# Altium footprint library WR-TBL_Pluggable Connector_5.08mm.PcbLib: 295 footprints (part 5 of 19)
Each footprint in its own frame and in the unit in brackets; x right, y up, seen from the top. Pads: shape width x height; smd on the part's side, far side on the other; paste and mask are expansions set on the pad; w line width, h text height; cw(c..) or ccw(c..) is an arc to the next point about the centre after c.
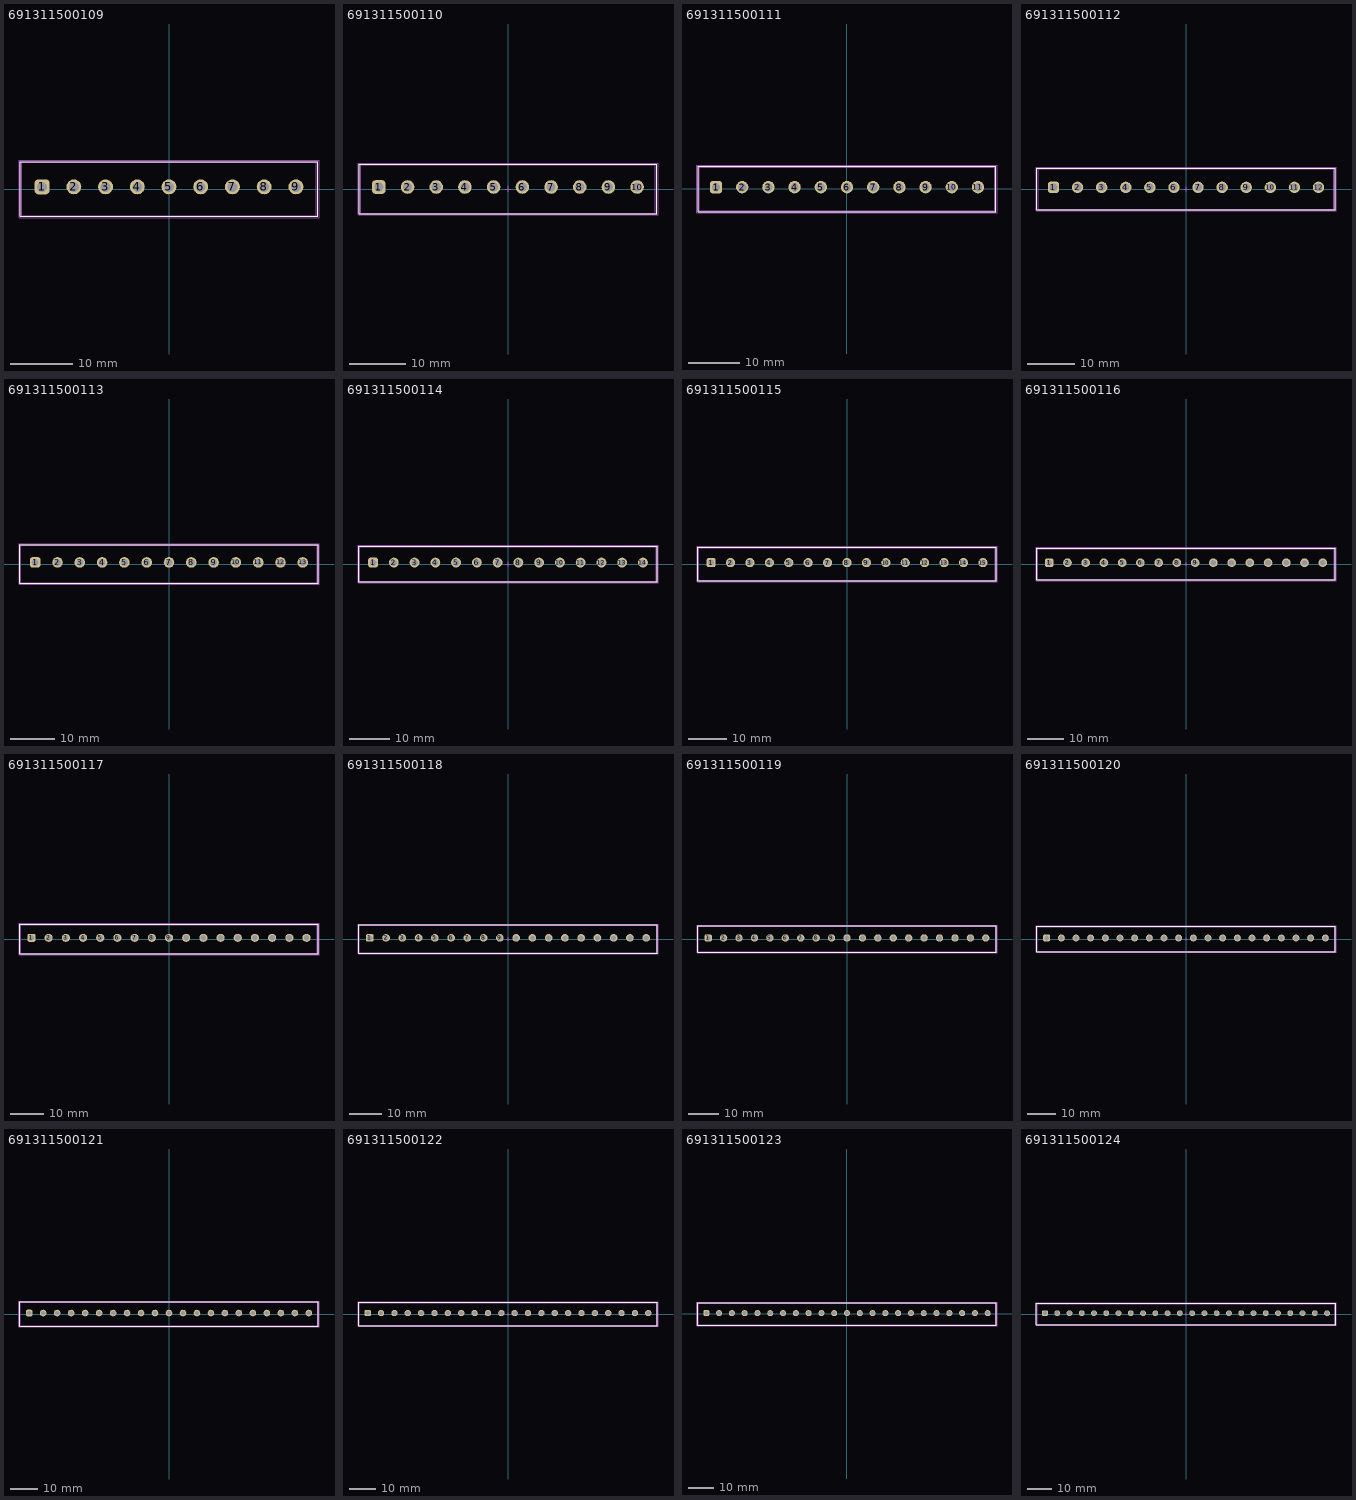
[diagram p4: the footprints below, top view; thin cyan lines are the x and y axes]

## 691311500109 [mm] "5,08mm - PCB Headers - Vertical - Closed ends -09p"
height 12
pads (9):
  rrect50% 2.4x2.4 hole 1.6: 1(-20.32,0.35)
  round 2.4 hole 1.6: 2(-15.24,0.35) 3(-10.16,0.35) 4(-5.08,0.35) 5(0,0.35) 6(5.08,0.35) 7(10.16,0.35) 8(15.24,0.35) 9(20.32,0.35)
Top Overlay:
  lines w0.2: -23.81,-4.4 23.81,-4.4 23.81,4.4 -23.81,4.4 -23.81,-4.4
Top Assembly:
  lines w0.1: -23.81,-4.4 -23.81,4.4 23.81,4.4 23.81,-4.4 -23.81,-4.4
Top Designator:
  text ".Designator" at -3.647,-0.357 h1
Top 3D Body:
  lines w0.1: -23.56,-4.25 23.56,-4.25 23.56,4.25 -23.56,4.25 -23.56,-4.25
Top Courtyard:
  lines w0.05: -24.01,-4.6 24.01,-4.6 24.01,4.6 -24.01,4.6 -24.01,-4.6
Top Component Center:
  lines w0.1: -0.5,0 0.5,0 ; 0,-0.5 0,0.5
3D body "691311500109.stp": height 12.05, standoff -3.95, extent -23.56,-4.25 23.56,4.25

## 691311500110 [mm] "5,08mm - PCB Headers - Vertical - Closed ends -10p"
height 12
pads (10):
  rrect50% 2.4x2.4 hole 1.6: 1(-22.86,0.35)
  round 2.4 hole 1.6: 2(-17.78,0.35) 3(-12.7,0.35) 4(-7.62,0.35) 5(-2.54,0.35) 6(2.54,0.35) 7(7.62,0.35) 8(12.7,0.35) 9(17.78,0.35) 10(22.86,0.35)
Top Overlay:
  lines w0.2: -26.35,-4.4 26.35,-4.4 26.35,4.4 -26.35,4.4 -26.35,-4.4
Top Assembly:
  lines w0.1: -26.35,-4.4 -26.35,4.4 26.35,4.4 26.35,-4.4 -26.35,-4.4
Top Designator:
  text ".Designator" at -3.647,-0.357 h1
Top 3D Body:
  lines w0.1: -26.1,-4.25 26.1,-4.25 26.1,4.25 -26.1,4.25 -26.1,-4.25
Top Courtyard:
  lines w0.05: -26.55,-4.6 26.55,-4.6 26.55,4.6 -26.55,4.6 -26.55,-4.6
Top Component Center:
  lines w0.1: -0.5,0 0.5,0 ; 0,-0.5 0,0.5
3D body "691311500110.stp": height 12.05, standoff -3.95, extent -26.1,-4.25 26.1,4.25

## 691311500111 [mm] "5,08mm - PCB Headers - Vertical - Closed ends -11p"
height 12
pads (11):
  rrect50% 2.4x2.4 hole 1.6: 1(-25.4,0.35)
  round 2.4 hole 1.6: 2(-20.32,0.35) 3(-15.24,0.35) 4(-10.16,0.35) 5(-5.08,0.35) 6(0,0.35) 7(5.08,0.35) 8(10.16,0.35) 9(15.24,0.35) 10(20.32,0.35) 11(25.4,0.35)
Top Overlay:
  lines w0.2: -28.89,-4.4 28.89,-4.4 28.89,4.4 -28.89,4.4 -28.89,-4.4
Top Assembly:
  lines w0.1: -28.89,-4.4 -28.89,4.4 28.89,4.4 28.89,-4.4 -28.89,-4.4
Top Designator:
  text ".Designator" at -3.647,-0.357 h1
Top 3D Body:
  lines w0.1: -28.64,-4.25 28.64,-4.25 28.64,4.25 -28.64,4.25 -28.64,-4.25
Top Courtyard:
  lines w0.05: -29.09,-4.6 29.09,-4.6 29.09,4.6 -29.09,4.6 -29.09,-4.6
Top Component Center:
  lines w0.1: -0.5,0 0.5,0 ; 0,-0.5 0,0.5
3D body "691311500111.stp": height 12.05, standoff -3.95, extent -28.64,-4.25 28.64,4.25

## 691311500112 [mm] "5,08mm - PCB Headers - Vertical - Closed ends -12p"
height 12
pads (12):
  rrect50% 2.4x2.4 hole 1.6: 1(-27.94,0.35)
  round 2.4 hole 1.6: 2(-22.86,0.35) 3(-17.78,0.35) 4(-12.7,0.35) 5(-7.62,0.35) 6(-2.54,0.35) 7(2.54,0.35) 8(7.62,0.35) 9(12.7,0.35) 10(17.78,0.35) 11(22.86,0.35) 12(27.94,0.35)
Top Overlay:
  lines w0.2: -31.43,-4.4 -31.43,4.4 31.43,4.4 31.43,-4.4 -31.43,-4.4
Top Assembly:
  lines w0.1: -31.43,-4.4 31.43,-4.4 31.43,4.4 -31.43,4.4 -31.43,-4.4
Top Designator:
  text ".Designator" at -3.647,-0.357 h1
Top 3D Body:
  lines w0.1: -31.18,-4.25 -31.18,4.25 31.18,4.25 31.18,-4.25 -31.18,-4.25
Top Courtyard:
  lines w0.05: -31.63,-4.6 -31.63,4.6 31.63,4.6 31.63,-4.6 -31.63,-4.6
Top Component Center:
  lines w0.1: -0.5,0 0.5,0 ; 0,-0.5 0,0.5
3D body "691311500112.stp": height 12.05, standoff -3.95, extent -31.18,-4.25 31.18,4.25

## 691311500113 [mm] "5,08mm - PCB Headers - Vertical - Closed ends -13p"
height 12
pads (13):
  rrect50% 2.4x2.4 hole 1.6: 1(-30.48,0.35)
  round 2.4 hole 1.6: 2(-25.4,0.35) 3(-20.32,0.35) 4(-15.24,0.35) 5(-10.16,0.35) 6(-5.08,0.35) 7(0,0.35) 8(5.08,0.35) 9(10.16,0.35) 10(15.24,0.35) 11(20.32,0.35) 12(25.4,0.35) 13(30.48,0.35)
Top Overlay:
  lines w0.2: -33.97,-4.4 33.97,-4.4 33.97,4.4 -33.97,4.4 -33.97,-4.4
Top Assembly:
  lines w0.1: -33.97,-4.4 -33.97,4.4 33.97,4.4 33.97,-4.4 -33.97,-4.4
Top Designator:
  text ".Designator" at -3.647,-0.357 h1
Top 3D Body:
  lines w0.1: -33.72,-4.25 33.72,-4.25 33.72,4.25 -33.72,4.25 -33.72,-4.25
Top Courtyard:
  lines w0.05: -34.17,-4.6 34.17,-4.6 34.17,4.6 -34.17,4.6 -34.17,-4.6
Top Component Center:
  lines w0.1: -0.5,0 0.5,0 ; 0,-0.5 0,0.5
3D body "691311500113.stp": height 12.05, standoff -3.95, extent -33.72,-4.25 33.72,4.25

## 691311500114 [mm] "5,08mm - PCB Headers - Vertical - Closed ends -14p"
height 12
pads (14):
  rrect50% 2.4x2.4 hole 1.6: 1(-33.02,0.35)
  round 2.4 hole 1.6: 2(-27.94,0.35) 3(-22.86,0.35) 4(-17.78,0.35) 5(-12.7,0.35) 6(-7.62,0.35) 7(-2.54,0.35) 8(2.54,0.35) 9(7.62,0.35) 10(12.7,0.35) 11(17.78,0.35) 12(22.86,0.35) 13(27.94,0.35) 14(33.02,0.35)
Top Overlay:
  lines w0.2: -36.51,-4.4 -36.51,4.4 36.51,4.4 36.51,-4.4 -36.51,-4.4
Top Assembly:
  lines w0.1: -36.51,-4.4 36.51,-4.4 36.51,4.4 -36.51,4.4 -36.51,-4.4
Top Designator:
  text ".Designator" at -3.647,-0.357 h1
Top 3D Body:
  lines w0.1: -36.26,-4.25 -36.26,4.25 36.26,4.25 36.26,-4.25 -36.26,-4.25
Top Courtyard:
  lines w0.05: -36.71,-4.6 -36.71,4.6 36.71,4.6 36.71,-4.6 -36.71,-4.6
Top Component Center:
  lines w0.1: -0.5,0 0.5,0 ; 0,-0.5 0,0.5
3D body "691311500114.stp": height 12.05, standoff -3.95, extent -36.26,-4.25 36.26,4.25

## 691311500115 [mm] "5,08mm - PCB Headers - Vertical - Closed ends -15p"
height 12
pads (15):
  rrect50% 2.4x2.4 hole 1.6: 1(-35.56,0.35)
  round 2.4 hole 1.6: 2(-30.48,0.35) 3(-25.4,0.35) 4(-20.32,0.35) 5(-15.24,0.35) 6(-10.16,0.35) 7(-5.08,0.35) 8(0,0.35) 9(5.08,0.35) 10(10.16,0.35) 11(15.24,0.35) 12(20.32,0.35) 13(25.4,0.35) 14(30.48,0.35) 15(35.56,0.35)
Top Overlay:
  lines w0.2: -39.05,-4.4 39.05,-4.4 39.05,4.4 -39.05,4.4 -39.05,-4.4
Top Assembly:
  lines w0.1: -39.05,-4.4 -39.05,4.4 39.05,4.4 39.05,-4.4 -39.05,-4.4
Top Designator:
  text ".Designator" at -3.647,-0.357 h1
Top 3D Body:
  lines w0.1: -38.8,-4.25 38.8,-4.25 38.8,4.25 -38.8,4.25 -38.8,-4.25
Top Courtyard:
  lines w0.05: -39.25,-4.6 39.25,-4.6 39.25,4.6 -39.25,4.6 -39.25,-4.6
Top Component Center:
  lines w0.1: -0.5,0 0.5,0 ; 0,-0.5 0,0.5
3D body "691311500115.stp": height 12.05, standoff -3.95, extent -38.8,-4.25 38.8,4.25

## 691311500116 [mm] "5,08mm - PCB Headers - Vertical - Closed ends -16p"
height 12
pads (16):
  rrect50% 2.4x2.4 hole 1.6: 1(-38.1,0.35)
  round 2.4 hole 1.6: 2(-33.02,0.35) 3(-27.94,0.35) 4(-22.86,0.35) 5(-17.78,0.35) 6(-12.7,0.35) 7(-7.62,0.35) 8(-2.54,0.35) 9(2.54,0.35) 10(7.62,0.35) 11(12.7,0.35) 12(17.78,0.35) 13(22.86,0.35) 14(27.94,0.35) 15(33.02,0.35) 16(38.1,0.35)
Top Overlay:
  lines w0.2: -41.59,-4.4 -41.59,4.4 41.59,4.4 41.59,-4.4 -41.59,-4.4
Top Assembly:
  lines w0.1: -41.59,-4.4 41.59,-4.4 41.59,4.4 -41.59,4.4 -41.59,-4.4
Top Designator:
  text ".Designator" at -3.647,-0.357 h1
Top 3D Body:
  lines w0.1: -41.34,-4.25 -41.34,4.25 41.34,4.25 41.34,-4.25 -41.34,-4.25
Top Courtyard:
  lines w0.05: -41.79,-4.6 -41.79,4.6 41.79,4.6 41.79,-4.6 -41.79,-4.6
Top Component Center:
  lines w0.1: -0.5,0 0.5,0 ; 0,-0.5 0,0.5
3D body "691311500116.stp": height 12.05, standoff -3.95, extent -41.34,-4.25 41.34,4.25

## 691311500117 [mm] "5,08mm - PCB Headers - Vertical - Closed ends -17p"
height 12
pads (17):
  rrect50% 2.4x2.4 hole 1.6: 1(-40.64,0.35)
  round 2.4 hole 1.6: 2(-35.56,0.35) 3(-30.48,0.35) 4(-25.4,0.35) 5(-20.32,0.35) 6(-15.24,0.35) 7(-10.16,0.35) 8(-5.08,0.35) 9(0,0.35) 10(5.08,0.35) 11(10.16,0.35) 12(15.24,0.35) 13(20.32,0.35) 14(25.4,0.35) 15(30.48,0.35) 16(35.56,0.35) 17(40.64,0.35)
Top Overlay:
  lines w0.2: -44.13,-4.4 44.13,-4.4 44.13,4.4 -44.13,4.4 -44.13,-4.4
Top Assembly:
  lines w0.1: -44.13,-4.4 -44.13,4.4 44.13,4.4 44.13,-4.4 -44.13,-4.4
Top Designator:
  text ".Designator" at -3.647,-0.357 h1
Top 3D Body:
  lines w0.1: -43.88,-4.25 43.88,-4.25 43.88,4.25 -43.88,4.25 -43.88,-4.25
Top Courtyard:
  lines w0.05: -44.33,-4.6 44.33,-4.6 44.33,4.6 -44.33,4.6 -44.33,-4.6
Top Component Center:
  lines w0.1: -0.5,0 0.5,0 ; 0,-0.5 0,0.5
3D body "691311500117.stp": height 12.05, standoff -3.95, extent -43.88,-4.25 43.88,4.25

## 691311500118 [mm] "5,08mm - PCB Headers - Vertical - Closed ends -18p"
height 12
pads (18):
  rrect50% 2.4x2.4 hole 1.6: 1(-43.18,0.35)
  round 2.4 hole 1.6: 2(-38.1,0.35) 3(-33.02,0.35) 4(-27.94,0.35) 5(-22.86,0.35) 6(-17.78,0.35) 7(-12.7,0.35) 8(-7.62,0.35) 9(-2.54,0.35) 10(2.54,0.35) 11(7.62,0.35) 12(12.7,0.35) 13(17.78,0.35) 14(22.86,0.35) 15(27.94,0.35) 16(33.02,0.35) 17(38.1,0.35) 18(43.18,0.35)
Top Overlay:
  lines w0.2: -46.67,-4.4 46.67,-4.4 46.67,4.4 -46.67,4.4 -46.67,-4.4
Top Assembly:
  lines w0.1: -46.67,-4.4 -46.67,4.4 46.67,4.4 46.67,-4.4 -46.67,-4.4
Top Designator:
  text ".Designator" at -3.647,-0.357 h1
Top 3D Body:
  lines w0.1: -46.42,-4.25 46.42,-4.25 46.42,4.25 -46.42,4.25 -46.42,-4.25
Top Courtyard:
  lines w0.05: -46.87,-4.6 46.87,-4.6 46.87,4.6 -46.87,4.6 -46.87,-4.6
Top Component Center:
  lines w0.1: -0.5,0 0.5,0 ; 0,-0.5 0,0.5
3D body "691311500118.stp": height 12.05, standoff -3.95, extent -46.42,-4.25 46.42,4.25

## 691311500119 [mm] "5,08mm - PCB Headers - Vertical - Closed ends -19p"
height 12
pads (19):
  rrect50% 2.4x2.4 hole 1.6: 1(-45.72,0.35)
  round 2.4 hole 1.6: 2(-40.64,0.35) 3(-35.56,0.35) 4(-30.48,0.35) 5(-25.4,0.35) 6(-20.32,0.35) 7(-15.24,0.35) 8(-10.16,0.35) 9(-5.08,0.35) 10(0,0.35) 11(5.08,0.35) 12(10.16,0.35) 13(15.24,0.35) 14(20.32,0.35) 15(25.4,0.35) 16(30.48,0.35) 17(35.56,0.35) 18(40.64,0.35) 19(45.72,0.35)
Top Overlay:
  lines w0.2: -49.21,-4.4 -49.21,4.4 49.21,4.4 49.21,-4.4 -49.21,-4.4
Top Assembly:
  lines w0.1: -49.21,-4.4 49.21,-4.4 49.21,4.4 -49.21,4.4 -49.21,-4.4
Top Designator:
  text ".Designator" at -3.647,-0.357 h1
Top 3D Body:
  lines w0.1: -48.96,-4.25 -48.96,4.25 48.96,4.25 48.96,-4.25 -48.96,-4.25
Top Courtyard:
  lines w0.05: -49.41,-4.6 -49.41,4.6 49.41,4.6 49.41,-4.6 -49.41,-4.6
Top Component Center:
  lines w0.1: -0.5,0 0.5,0 ; 0,-0.5 0,0.5
3D body "691311500119.stp": height 12.05, standoff -3.95, extent -48.96,-4.25 48.96,4.25

## 691311500120 [mm] "5,08mm - PCB Headers - Vertical - Closed ends -20p"
height 12
pads (20):
  rrect50% 2.4x2.4 hole 1.6: 1(-48.26,0.35)
  round 2.4 hole 1.6: 2(-43.18,0.35) 3(-38.1,0.35) 4(-33.02,0.35) 5(-27.94,0.35) 6(-22.86,0.35) 7(-17.78,0.35) 8(-12.7,0.35) 9(-7.62,0.35) 10(-2.54,0.35) 11(2.54,0.35) 12(7.62,0.35) 13(12.7,0.35) 14(17.78,0.35) 15(22.86,0.35) 16(27.94,0.35) 17(33.02,0.35) 18(38.1,0.35) 19(43.18,0.35) 20(48.26,0.35)
Top Overlay:
  lines w0.2: -51.75,-4.4 -51.75,4.4 51.75,4.4 51.75,-4.4 -51.75,-4.4
Top Assembly:
  lines w0.1: -51.75,-4.4 51.75,-4.4 51.75,4.4 -51.75,4.4 -51.75,-4.4
Top Designator:
  text ".Designator" at -3.647,-0.357 h1
Top 3D Body:
  lines w0.1: -51.5,-4.25 -51.5,4.25 51.5,4.25 51.5,-4.25 -51.5,-4.25
Top Courtyard:
  lines w0.05: -51.95,-4.6 -51.95,4.6 51.95,4.6 51.95,-4.6 -51.95,-4.6
Top Component Center:
  lines w0.1: -0.5,0 0.5,0 ; 0,-0.5 0,0.5
3D body "691311500120.stp": height 12.05, standoff -3.95, extent -51.5,-4.25 51.5,4.25

## 691311500121 [mm] "5,08mm - PCB Headers - Vertical - Closed ends -21p"
height 12
pads (21):
  rrect50% 2.4x2.4 hole 1.6: 1(-50.8,0.35)
  round 2.4 hole 1.6: 2(-45.72,0.35) 3(-40.64,0.35) 4(-35.56,0.35) 5(-30.48,0.35) 6(-25.4,0.35) 7(-20.32,0.35) 8(-15.24,0.35) 9(-10.16,0.35) 10(-5.08,0.35) 11(0,0.35) 12(5.08,0.35) 13(10.16,0.35) 14(15.24,0.35) 15(20.32,0.35) 16(25.4,0.35) 17(30.48,0.35) 18(35.56,0.35) 19(40.64,0.35) 20(45.72,0.35) 21(50.8,0.35)
Top Overlay:
  lines w0.2: -54.29,-4.4 -54.29,4.4 54.29,4.4 54.29,-4.4 -54.29,-4.4
Top Assembly:
  lines w0.1: -54.29,-4.4 54.29,-4.4 54.29,4.4 -54.29,4.4 -54.29,-4.4
Top Designator:
  text ".Designator" at -3.647,-0.357 h1
Top 3D Body:
  lines w0.1: -54.04,-4.25 -54.04,4.25 54.04,4.25 54.04,-4.25 -54.04,-4.25
Top Courtyard:
  lines w0.05: -54.49,-4.6 -54.49,4.6 54.49,4.6 54.49,-4.6 -54.49,-4.6
Top Component Center:
  lines w0.1: -0.5,0 0.5,0 ; 0,-0.5 0,0.5
3D body "691311500121.stp": height 12.05, standoff -3.95, extent -54.04,-4.25 54.04,4.25

## 691311500122 [mm] "5,08mm - PCB Headers - Vertical - Closed ends -22p"
height 12
pads (22):
  rrect50% 2.4x2.4 hole 1.6: 1(-53.34,0.35)
  round 2.4 hole 1.6: 2(-48.26,0.35) 3(-43.18,0.35) 4(-38.1,0.35) 5(-33.02,0.35) 6(-27.94,0.35) 7(-22.86,0.35) 8(-17.78,0.35) 9(-12.7,0.35) 10(-7.62,0.35) 11(-2.54,0.35) 12(2.54,0.35) 13(7.62,0.35) 14(12.7,0.35) 15(17.78,0.35) 16(22.86,0.35) 17(27.94,0.35) 18(33.02,0.35) 19(38.1,0.35) 20(43.18,0.35) 21(48.26,0.35) 22(53.34,0.35)
Top Overlay:
  lines w0.2: -56.83,-4.4 56.83,-4.4 56.83,4.4 -56.83,4.4 -56.83,-4.4
Top Assembly:
  lines w0.1: -56.83,-4.4 -56.83,4.4 56.83,4.4 56.83,-4.4 -56.83,-4.4
Top Designator:
  text ".Designator" at -3.647,-0.357 h1
Top 3D Body:
  lines w0.1: -56.58,-4.25 56.58,-4.25 56.58,4.25 -56.58,4.25 -56.58,-4.25
Top Courtyard:
  lines w0.05: -57.03,-4.6 57.03,-4.6 57.03,4.6 -57.03,4.6 -57.03,-4.6
Top Component Center:
  lines w0.1: -0.5,0 0.5,0 ; 0,-0.5 0,0.5
3D body "691311500122.stp": height 12.05, standoff -3.95, extent -56.58,-4.25 56.58,4.25

## 691311500123 [mm] "5,08mm - PCB Headers - Vertical - Closed ends -23p"
height 12
pads (23):
  rrect50% 2.4x2.4 hole 1.6: 1(-55.88,0.35)
  round 2.4 hole 1.6: 2(-50.8,0.35) 3(-45.72,0.35) 4(-40.64,0.35) 5(-35.56,0.35) 6(-30.48,0.35) 7(-25.4,0.35) 8(-20.32,0.35) 9(-15.24,0.35) 10(-10.16,0.35) 11(-5.08,0.35) 12(0,0.35) 13(5.08,0.35) 14(10.16,0.35) 15(15.24,0.35) 16(20.32,0.35) 17(25.4,0.35) 18(30.48,0.35) 19(35.56,0.35) 20(40.64,0.35) 21(45.72,0.35) 22(50.8,0.35) 23(55.88,0.35)
Top Overlay:
  lines w0.2: -59.37,-4.4 -59.37,4.4 59.37,4.4 59.37,-4.4 -59.37,-4.4
Top Assembly:
  lines w0.1: -59.37,-4.4 59.37,-4.4 59.37,4.4 -59.37,4.4 -59.37,-4.4
Top Designator:
  text ".Designator" at -3.647,-0.357 h1
Top 3D Body:
  lines w0.1: -59.12,-4.25 -59.12,4.25 59.12,4.25 59.12,-4.25 -59.12,-4.25
Top Courtyard:
  lines w0.05: -59.57,-4.6 -59.57,4.6 59.57,4.6 59.57,-4.6 -59.57,-4.6
Top Component Center:
  lines w0.1: -0.5,0 0.5,0 ; 0,-0.5 0,0.5
3D body "691311500123.stp": height 12.05, standoff -3.95, extent -59.12,-4.25 59.12,4.25

## 691311500124 [mm] "5,08mm - PCB Headers - Vertical - Closed ends -24p"
height 12
pads (24):
  rrect50% 2.4x2.4 hole 1.6: 1(-58.42,0.35)
  round 2.4 hole 1.6: 2(-53.34,0.35) 3(-48.26,0.35) 4(-43.18,0.35) 5(-38.1,0.35) 6(-33.02,0.35) 7(-27.94,0.35) 8(-22.86,0.35) 9(-17.78,0.35) 10(-12.7,0.35) 11(-7.62,0.35) 12(-2.54,0.35) 13(2.54,0.35) 14(7.62,0.35) 15(12.7,0.35) 16(17.78,0.35) 17(22.86,0.35) 18(27.94,0.35) 19(33.02,0.35) 20(38.1,0.35) 21(43.18,0.35) 22(48.26,0.35) 23(53.34,0.35) 24(58.42,0.35)
Top Overlay:
  lines w0.2: -61.91,-4.4 -61.91,4.4 61.91,4.4 61.91,-4.4 -61.91,-4.4
Top Assembly:
  lines w0.1: -61.91,-4.4 61.91,-4.4 61.91,4.4 -61.91,4.4 -61.91,-4.4
Top Designator:
  text ".Designator" at -3.647,-0.357 h1
Top 3D Body:
  lines w0.1: -61.66,-4.25 -61.66,4.25 61.66,4.25 61.66,-4.25 -61.66,-4.25
Top Courtyard:
  lines w0.05: -62.11,-4.6 -62.11,4.6 62.11,4.6 62.11,-4.6 -62.11,-4.6
Top Component Center:
  lines w0.1: -0.5,0 0.5,0 ; 0,-0.5 0,0.5
3D body "691311500124.stp": height 12.05, standoff -3.95, extent -61.66,-4.25 61.66,4.25